# Altium schematic symbol library ISP2454-LX_Libraries.SchLib: 1 symbol
Pins are listed as number, name and electrical type; pins without a type are passive.

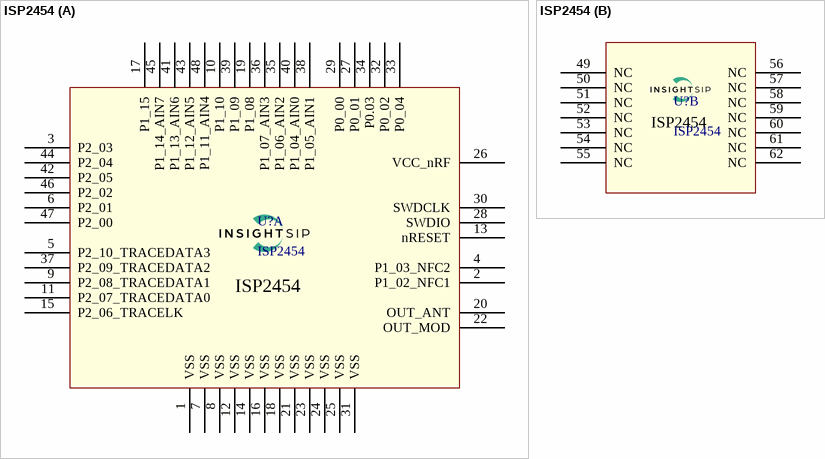
[diagram p0: symbol ISP2454]

## ISP2454
designator U?
ISP2454-LX ISP module BLE based on nRF54L15
footprint ISP2454 (Footprint of ISP2454)
part A pins: 1 VSS, 2 P1_02_NFC1, 3 P2_03, 4 P1_03_NFC2, 5 P2_10_TRACEDATA3, 6 P2_01, 7 VSS, 8 VSS, 9 P2_08_TRACEDATA1, 10 P1_10, 11 P2_07_TRACEDATA0, 12 VSS, 13 nRESET, 14 VSS, 15 P2_06_TRACELK, 16 VSS, 17 P1_15, 18 VSS, 19 P1_08, 20 OUT_ANT, 21 VSS, 22 OUT_MOD, 23 VSS, 24 VSS, 25 VSS, 26 VCC_nRF, 27 P0_01, 28 SWDIO, 29 P0_00, 30 SWDCLK, 31 VSS, 32 P0_02, 33 P0_04, 34 P0.03, 35 P1_06_AIN2, 36 P1_07_AIN3, 37 P2_09_TRACEDATA2, 38 P1_05_AIN1, 39 P1_09, 40 P1_04_AIN0, 41 P1_13_AIN6, 42 P2_05, 43 P1_12_AIN5, 44 P2_04, 45 P1_14_AIN7, 46 P2_02, 47 P2_00, 48 P1_11_AIN4
part B pins: 49 NC, 50 NC, 51 NC, 52 NC, 53 NC, 54 NC, 55 NC, 56 NC, 57 NC, 58 NC, 59 NC, 60 NC, 61 NC, 62 NC